# Altium footprint library FootPrintLib_10.PcbLib: 270 footprints (part 12 of 17)
Each footprint in its own frame and in the unit in brackets; x right, y up, seen from the top. Pads: shape width x height; smd on the part's side, far side on the other; paste and mask are expansions set on the pad; w line width, h text height; cw(c..) or ccw(c..) is an arc to the next point about the centre after c.
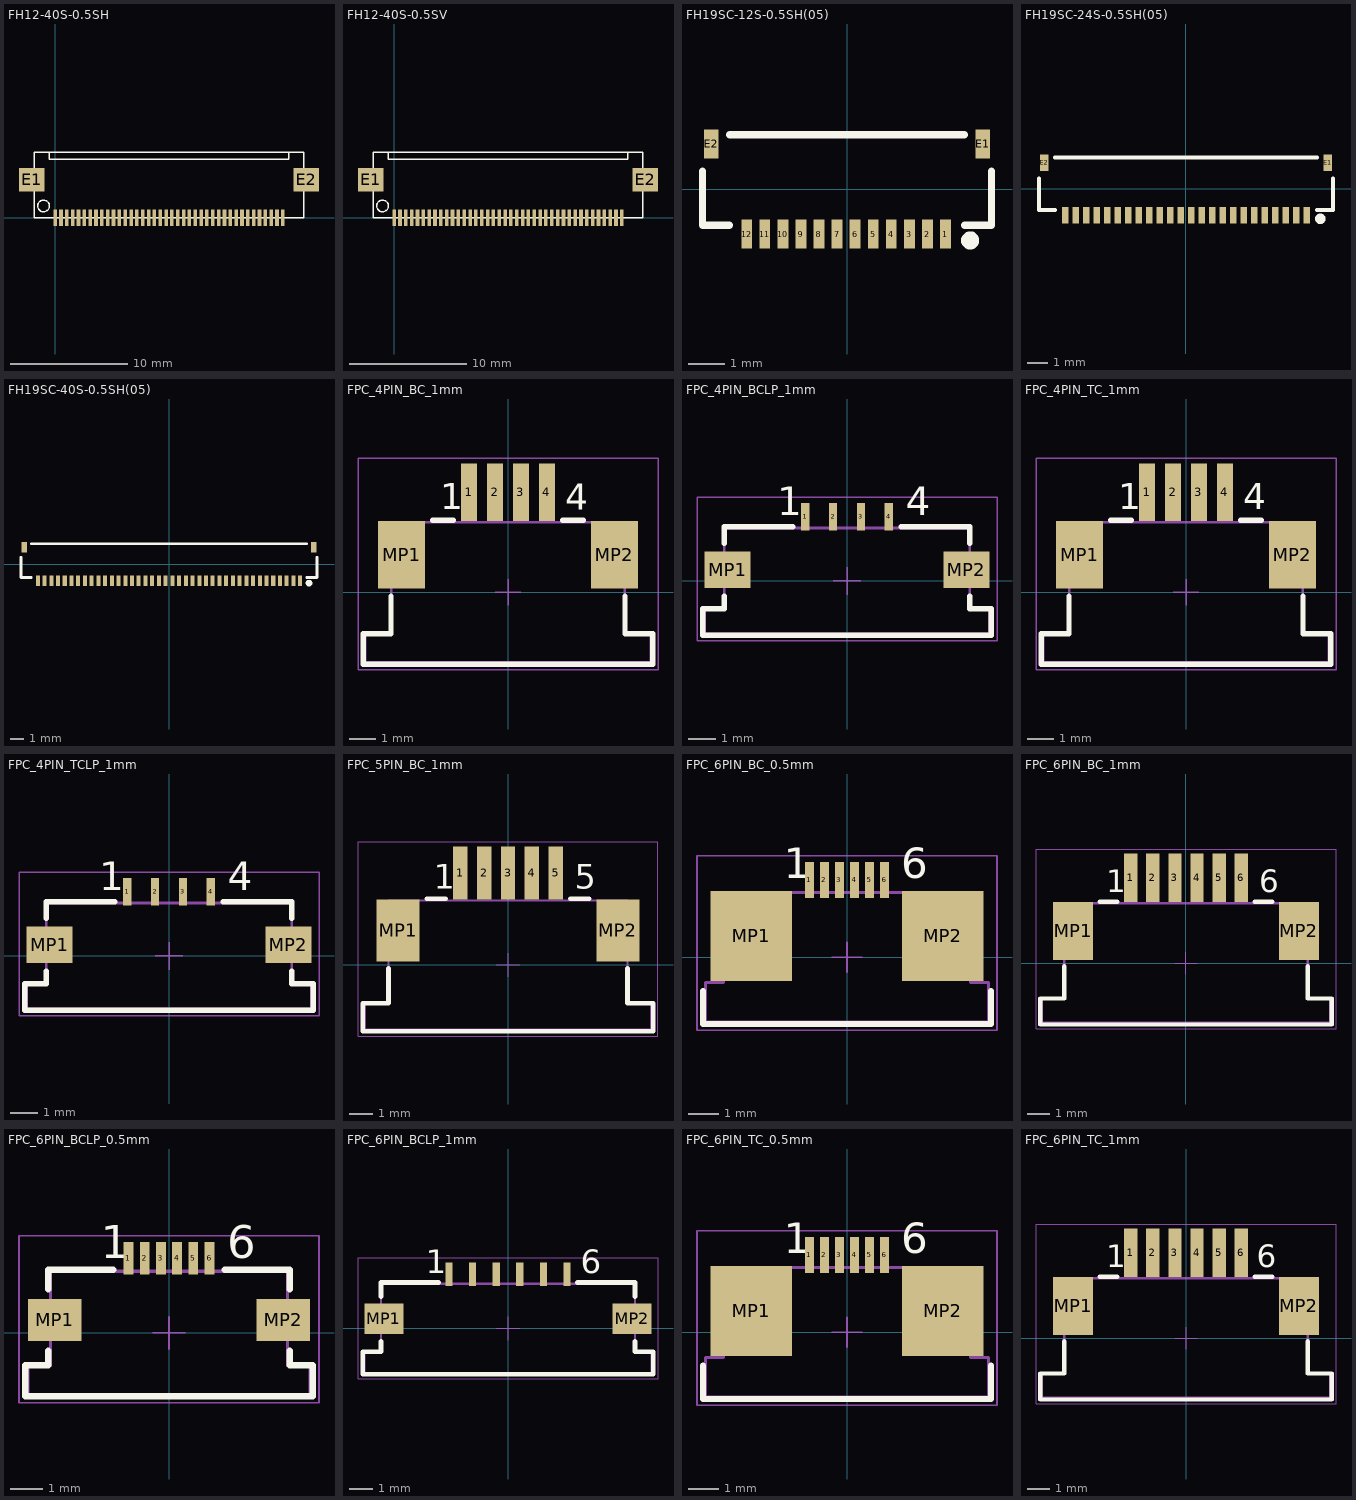
[diagram p11: the footprints below, top view; thin cyan lines are the x and y axes]

## FH12-40S-0.5SH [mm]
pads (42):
  rect 0.31x1.4 smd: 1(0,0) 2(0.5,0) 3(1,0) 4(1.5,0) 5(2,0) 6(2.5,0) 7(3,0) 8(3.5,0) 9(4,0) 10(4.5,0) 11(5,0) 12(5.5,0) 13(6,0) 14(6.5,0) 15(7,0) 16(7.5,0) 17(8,0) 18(8.5,0) 19(9,0) 20(9.5,0) 21(10,0) 22(10.5,0) 23(11,0) 24(11.5,0) 25(12,0) 26(12.5,0) 27(13,0) 28(13.5,0) 29(14,0) 30(14.5,0) 31(15,0) 32(15.5,0) 33(16,0) 34(16.5,0) 35(17,0) 36(17.5,0) 37(18,0) 38(18.5,0) 39(19,0) 40(19.5,0)
  rect 2.2x2 smd: E1(-2,3.25) E2(21.5,3.25)
Top Overlay:
  circle w0.127: c-1,1 r0.5
  lines w0.127: -0.5,5.5 -0.5,5 20,5 20,5.5 ; -1.8,0 21.3,0 21.3,5.6 -1.8,5.6 -1.8,0

## FH12-40S-0.5SV [mm]
pads (42):
  rect 0.31x1.4 smd: 1(19.5,0) 2(19,0) 3(18.5,0) 4(18,0) 5(17.5,0) 6(17,0) 7(16.5,0) 8(16,0) 9(15.5,0) 10(15,0) 11(14.5,0) 12(14,0) 13(13.5,0) 14(13,0) 15(12.5,0) 16(12,0) 17(11.5,0) 18(11,0) 19(10.5,0) 20(10,0) 21(9.5,0) 22(9,0) 23(8.5,0) 24(8,0) 25(7.5,0) 26(7,0) 27(6.5,0) 28(6,0) 29(5.5,0) 30(5,0) 31(4.5,0) 32(4,0) 33(3.5,0) 34(3,0) 35(2.5,0) 36(2,0) 37(1.5,0) 38(1,0) 39(0.5,0) 40(0,0)
  rect 2.2x2 smd: E1(-2,3.25) E2(21.5,3.25)
Top Overlay:
  circle w0.127: c-1,1 r0.5
  lines w0.127: -0.5,5.5 -0.5,5 20,5 20,5.5 ; -1.8,0 21.3,0 21.3,5.6 -1.8,5.6 -1.8,0

## FH19SC-12S-0.5SH(05) [mm] "FFC & FPC Connectors 0.5MM 12 POS R/A SMT FFC/FPC THICK .3MM"
height 0.9
pads (14):
  rect 0.3x0.8 smd: 1(2.725,-1.25) 2(2.225,-1.25) 3(1.725,-1.25) 4(1.225,-1.25) 5(0.725,-1.25) 6(0.225,-1.25) 7(-0.275,-1.25) 8(-0.775,-1.25) 9(-1.275,-1.25) 10(-1.775,-1.25) 11(-2.275,-1.25) 12(-2.775,-1.25)
  rect 0.4x0.8 smd: E1(3.75,1.25) E2(-3.75,1.25)
Top Overlay:
  circle w0.25: c3.406,-1.422 r0.125
  lines w0.2: -4,0.5 -4,-1 -3.25,-1 ; -3.25,1.5 3.25,1.5 ; 3.25,-1 4,-1 4,0.5

## FH19SC-24S-0.5SH(05) [mm] "0.5 mm Pitch FPC/FFC Connectors"
height 0.9
pads (26):
  rect 0.3x0.8 smd: 1(5.75,-1.25) 2(5.25,-1.25) 3(4.75,-1.25) 4(4.25,-1.25) 5(3.75,-1.25) 6(3.25,-1.25) 7(2.75,-1.25) 8(2.25,-1.25) 9(1.75,-1.25) 10(1.25,-1.25) 11(0.75,-1.25) 12(0.25,-1.25) 13(-0.25,-1.25) 14(-0.75,-1.25) 15(-1.25,-1.25) 16(-1.75,-1.25) 17(-2.25,-1.25) 18(-2.75,-1.25) 19(-3.25,-1.25) 20(-3.75,-1.25) 21(-4.25,-1.25) 22(-4.75,-1.25) 23(-5.25,-1.25) 24(-5.75,-1.25)
  rect 0.4x0.8 smd: E1(6.75,1.25) E2(-6.75,1.25)
Top Overlay:
  circle w0.25: c6.406,-1.422 r0.125
  lines w0.2: -7,0.5 -7,-1 -6.25,-1 ; -6.25,1.5 6.25,1.5 ; 6.25,-1 7,-1 7,0.5

## FH19SC-40S-0.5SH(05) [mm] "0.5 mm Pitch FPC/FFC Connector"
height 0.9
pads (42):
  rect 0.3x0.8 smd: 1(9.75,-1.25) 2(9.25,-1.25) 3(8.75,-1.25) 4(8.25,-1.25) 5(7.75,-1.25) 6(7.25,-1.25) 7(6.75,-1.25) 8(6.25,-1.25) 9(5.75,-1.25) 10(5.25,-1.25) 11(4.75,-1.25) 12(4.25,-1.25) 13(3.75,-1.25) 14(3.25,-1.25) 15(2.75,-1.25) 16(2.25,-1.25) 17(1.75,-1.25) 18(1.25,-1.25) 19(0.75,-1.25) 20(0.25,-1.25) 21(-0.25,-1.25) 22(-0.75,-1.25) 23(-1.25,-1.25) 24(-1.75,-1.25) 25(-2.25,-1.25) 26(-2.75,-1.25) 27(-3.25,-1.25) 28(-3.75,-1.25) 29(-4.25,-1.25) 30(-4.75,-1.25) 31(-5.25,-1.25) 32(-5.75,-1.25) 33(-6.25,-1.25) 34(-6.75,-1.25) 35(-7.25,-1.25) 36(-7.75,-1.25) 37(-8.25,-1.25) 38(-8.75,-1.25) 39(-9.25,-1.25) 40(-9.75,-1.25)
  rect 0.4x0.8 smd: E1(10.75,1.25) E2(-10.75,1.25)
Top Overlay:
  circle w0.25: c10.406,-1.422 r0.125
  lines w0.2: -11,0.5 -11,-1 -10.25,-1 ; -10.25,1.5 10.25,1.5 ; 10.25,-1 11,-1 11,0.5
3D body "31820e.STEP": height 1.2, standoff -0.02, extent -11,-1.33 11,1.67

## FPC_4PIN_BC_1mm [mm] "ZIF Connectors, Horizontal, Bottom Contact, pitch 1mm, 4p"
height 3.15
pads (6):
  rect 0.6x2.2 smd: 1(-1.5,3.85) 2(-0.5,3.85) 3(0.5,3.85) 4(1.5,3.85)
  rect 1.8x2.6 smd: MP1(-4.1,1.45) MP2(4.1,1.45)
Top Overlay:
  lines w0.2: -4.5,-0.15 -4.5,-1.6 -5.575,-1.6 -5.575,-2.775 5.575,-2.775 5.575,-1.6 4.5,-1.6 4.5,-0.15 ; -2.9,2.775 -2.1,2.775 ; 2.1,2.775 2.9,2.775
  text "4" at 2.213,3.18 h1.02
  text "1" at -2.6,3.2 h1.02
Mechanical 13:
  lines w0.1: -5.5,-2.7 5.5,-2.7 5.5,-1.6 4.5,-1.6 4.5,2.7 -4.5,2.7 -4.5,-1.6 -5.5,-1.6 -5.5,-2.7
Mechanical 15:
  lines w0.05: -0.5,0 0.5,0 ; 0,-0.5 0,0.5 ; -5.775,-2.975 5.775,-2.975 5.775,5.15 -5.775,5.15 -5.775,-2.975
3D body "68610414422.stp": height 3.02, standoff 0.01, extent -5.5,-2.7 5.5,4.4

## FPC_4PIN_BCLP_1mm [mm] "ZIF Connectors, Horizontal, Bottom Contact Low Profile, pitch 1mm, 4p"
height 1.3
pads (6):
  rect 0.3x1 smd: 1(-1.5,2.3) 2(-0.5,2.3) 3(0.5,2.3) 4(1.5,2.3)
  rect 1.65x1.3 smd: MP1(-4.275,0.4) MP2(4.275,0.4)
Top Overlay:
  lines w0.2: -4.4,-0.55 -4.4,-1 -5.175,-1 -5.175,-1.95 5.175,-1.95 5.175,-1 4.4,-1 4.4,-0.55 ; -4.4,1.35 -4.4,1.95 -1.95,1.95 ; 1.95,1.95 4.4,1.95 4.4,1.35
  text "4" at 2.1,2.35 h1.02
  text "1" at -2.5,2.35 h1.02
Mechanical 13:
  lines w0.1: -5.1,-1 -4.4,-1 -4.4,1.9 4.4,1.9 4.4,-1 5.1,-1 5.1,-1.9 -5.1,-1.9 -5.1,-1 ; -5.1,-1 -5.1,-1
Mechanical 15:
  lines w0.05: -0.5,0 0.5,0 ; 0,-0.5 0,0.5 ; -5.375,-2.15 5.375,-2.15 5.375,3 -5.375,3 -5.375,-2.15
3D body "686104183522.stp": height 1.24, standoff -0.01, extent -5.1,-1.9 5.1,2.35

## FPC_4PIN_TC_1mm [mm] "ZIF Connectors, Horizontal, Top Contact, pitch 1mm, 4p"
height 3.15
pads (6):
  rect 0.6x2.2 smd: 1(-1.5,3.85) 2(-0.5,3.85) 3(0.5,3.85) 4(1.5,3.85)
  rect 1.8x2.6 smd: MP1(-4.1,1.45) MP2(4.1,1.45)
Top Overlay:
  lines w0.2: -4.5,-0.15 -4.5,-1.6 -5.575,-1.6 -5.575,-2.775 5.575,-2.775 5.575,-1.6 4.5,-1.6 4.5,-0.15 ; -2.9,2.775 -2.1,2.775 ; 2.1,2.775 2.9,2.775
  text "1" at -2.6,3.2 h1.02
  text "4" at 2.2,3.2 h1.02
Mechanical 13:
  lines w0.1: -5.5,-2.7 -5.5,-1.6 -4.5,-1.6 -4.5,2.7 4.5,2.7 4.5,-1.6 5.5,-1.6 5.5,-2.7 -5.5,-2.7
Mechanical 15:
  lines w0.05: -0.5,0 0.5,0 ; 0,-0.5 0,0.5 ; -5.775,-2.975 5.775,-2.975 5.775,5.15 -5.775,5.15 -5.775,-2.975
3D body "68610414122.stp": height 3.02, standoff 0.02, extent -5.5,-2.7 5.5,4.4

## FPC_4PIN_TCLP_1mm [mm] "ZIF Connectors, Horizontal, Top Contact Low Profile, pitch 1mm, 4p"
height 1.3
pads (6):
  rect 0.3x1 smd: 1(-1.5,2.3) 2(-0.5,2.3) 3(0.5,2.3) 4(1.5,2.3)
  rect 1.65x1.3 smd: MP1(-4.275,0.4) MP2(4.275,0.4)
Top Overlay:
  lines w0.2: -4.4,-0.55 -4.4,-1 -5.175,-1 -5.175,-1.95 5.175,-1.95 5.175,-1 4.4,-1 4.4,-0.55 ; -4.4,1.35 -4.4,1.95 -1.95,1.95 ; 1.95,1.95 4.4,1.95 4.4,1.35
  text "1" at -2.5,2.35 h1.02
  text "4" at 2.1,2.35 h1.02
Mechanical 13:
  lines w0.1: -5.1,-1 -5.1,-1.9 5.1,-1.9 5.1,-1 4.4,-1 4.4,1.9 -4.4,1.9 -4.4,-1 -5.1,-1 ; -5.1,-1 -5.1,-1
Mechanical 15:
  lines w0.05: -0.5,0 0.5,0 ; 0,-0.5 0,0.5 ; -5.375,-2.15 -5.375,3 5.375,3 5.375,-2.15 -5.375,-2.15
3D body "686104183422.stp": height 1.28, standoff -0.01, extent -5.1,-1.9 5.1,2.35

## FPC_5PIN_BC_1mm [mm] "ZIF Connectors, Horizontal, Bottom Contact, pitch 1mm, 5p"
height 3.15
pads (7):
  rect 0.6x2.2 smd: 1(-2,3.85) 2(-1,3.85) 3(0,3.85) 4(1,3.85) 5(2,3.85)
  rect 1.8x2.6 smd: MP1(-4.6,1.45) MP2(4.6,1.45)
Top Overlay:
  lines w0.2: -5,-0.15 -5,-1.6 -6.075,-1.6 -6.075,-2.775 6.075,-2.775 6.075,-1.6 5,-1.6 5,-0.15 ; -3.4,2.775 -2.6,2.775 ; 2.6,2.775 3.4,2.775
  text "5" at 2.8,3.2 h1.02
  text "1" at -3.1,3.2 h1.02
Mechanical 13:
  lines w0.1: -6,-2.7 -6,-1.6 -5,-1.6 -5,2.7 5,2.7 5,-1.6 6,-1.6 6,-2.7 -6,-2.7
Mechanical 15:
  lines w0.05: -0.5,0 0.5,0 ; 0,-0.5 0,0.5 ; -6.275,-2.975 -6.275,5.15 6.275,5.15 6.275,-2.975 -6.275,-2.975
3D body "68610514422.stp": height 3.02, standoff 0.01, extent -6,-2.7 6,4.4

## FPC_6PIN_BC_0.5mm [mm] "ZIF Connectors, Horizontal, Bottom Contact, pitch 0.5mm, 6p"
height 2.25
pads (8):
  rect 0.3x1.2 smd: 1(-1.25,2.56) 2(-0.75,2.56) 3(-0.25,2.56) 4(0.25,2.56) 5(0.75,2.56) 6(1.25,2.56)
  rect 2.7x3 smd: MP1(-3.18,0.7) MP2(3.18,0.7)
Top Overlay:
  lines w0.2: -4.775,-1.125 -4.775,-2.225 4.775,-2.225 4.775,-1.125
  text "1" at -2.1,2.61 h1.02
  text "6" at 1.8,2.61 h1.02
Mechanical 13:
  lines w0.1: -4.7,-2.15 -4.7,-0.85 -4.1,-0.85 -4.1,2.15 4.1,2.15 4.1,-0.85 4.7,-0.85 4.7,-2.15 -4.7,-2.15
Mechanical 15:
  lines w0.05: -0.5,0 0.5,0 ; 0,-0.5 0,0.5 ; -4.975,-2.425 4.975,-2.425 4.975,3.36 -4.975,3.36 -4.975,-2.425
3D body "68710614522.stp": height 2.1, standoff 0, extent -4.7,-2.15 4.7,2.95

## FPC_6PIN_BC_1mm [mm] "ZIF Connectors, Horizontal, Bottom Contact, pitch 1mm, 6p"
height 3.15
pads (8):
  rect 0.6x2.2 smd: 1(-2.5,3.85) 2(-1.5,3.85) 3(-0.5,3.85) 4(0.5,3.85) 5(1.5,3.85) 6(2.5,3.85)
  rect 1.8x2.6 smd: MP1(-5.1,1.45) MP2(5.1,1.45)
Top Overlay:
  lines w0.2: -5.5,-0.15 -5.5,-1.6 -6.575,-1.6 -6.575,-2.775 6.575,-2.775 6.575,-1.6 5.5,-1.6 5.5,-0.15 ; -3.9,2.775 -3.1,2.775 ; 3.1,2.775 3.9,2.775
  text "1" at -3.6,3.2 h1.02
  text "6" at 3.3,3.2 h1.02
Mechanical 13:
  lines w0.1: -6.5,-2.7 -6.5,-1.6 -5.5,-1.6 -5.5,2.7 5.5,2.7 5.5,-1.6 6.5,-1.6 6.5,-2.7 -6.5,-2.7
Mechanical 15:
  lines w0.05: -0.5,0 0.5,0 ; 0,-0.5 0,0.5 ; -6.775,-2.975 -6.775,5.15 6.775,5.15 6.775,-2.975 -6.775,-2.975
3D body "68610614422.stp": height 3.02, standoff 0.01, extent -6.5,-2.7 6.5,4.4

## FPC_6PIN_BCLP_0.5mm [mm] "ZIF Connectors, Horizontal, Bottom Contact Low Profile, pitch 0.5mm, 6p"
height 1.3
pads (8):
  rect 0.3x1 smd: 1(-1.25,2.3) 2(-0.75,2.3) 3(-0.25,2.3) 4(0.25,2.3) 5(0.75,2.3) 6(1.25,2.3)
  rect 1.65x1.3 smd: MP1(-3.525,0.4) MP2(3.525,0.4)
Top Overlay:
  lines w0.2: -3.725,-0.55 -3.725,-1 -4.425,-1 -4.425,-1.95 4.425,-1.95 4.425,-1 3.725,-1 3.725,-0.55 ; -3.725,1.35 -3.725,1.95 -1.725,1.95 ; 1.725,1.95 3.725,1.95 3.725,1.35
  text "1" at -2.1,2.3 h1.02
  text "6" at 1.8,2.3 h1.02
Mechanical 13:
  lines w0.1: -4.35,-1.9 -4.35,-1 -3.65,-1 -3.65,1.9 3.65,1.9 3.65,-1 4.35,-1 4.35,-1.9 -4.35,-1.9
Mechanical 15:
  lines w0.05: -0.5,0 0.5,0 ; 0,-0.5 0,0.5 ; -4.625,-2.15 -4.625,3 4.625,3 4.625,-2.15 -4.625,-2.15
3D body "687106183722.stp": height 1.28, standoff -0.01, extent -4.35,-1.9 4.35,2.35

## FPC_6PIN_BCLP_1mm [mm] "ZIF Connectors, Horizontal, Bottom Contact Low Profile, pitch 1mm, 6p"
height 1.3
pads (8):
  rect 0.3x1 smd: 1(-2.5,2.3) 2(-1.5,2.3) 3(-0.5,2.3) 4(0.5,2.3) 5(1.5,2.3) 6(2.5,2.3)
  rect 1.65x1.3 smd: MP1(-5.275,0.4) MP2(5.275,0.4)
Top Overlay:
  lines w0.2: -5.4,-0.55 -5.4,-1 -6.175,-1 -6.175,-1.95 6.175,-1.95 6.175,-1 5.4,-1 5.4,-0.55 ; -5.4,1.35 -5.4,1.95 -2.95,1.95 ; 2.95,1.95 5.4,1.95 5.4,1.35
  text "6" at 3.1,2.35 h1.02
  text "1" at -3.5,2.35 h1.02
Mechanical 13:
  lines w0.1: -6.1,-1 -6.1,-1.9 6.1,-1.9 6.1,-1 5.4,-1 5.4,1.9 -5.4,1.9 -5.4,-1 -6.1,-1 ; -6.1,-1 -6.1,-1
Mechanical 15:
  lines w0.05: -0.5,0 0.5,0 ; 0,-0.5 0,0.5 ; -6.375,-2.15 -6.375,3 6.375,3 6.375,-2.15 -6.375,-2.15
3D body "686106183522.stp": height 1.24, standoff -0.01, extent -6.1,-1.9 6.1,2.35

## FPC_6PIN_TC_0.5mm [mm] "ZIF Connectors, Horizontal, Top Contact, pitch 0.5mm, 6p"
height 2.25
pads (8):
  rect 0.3x1.2 smd: 1(-1.25,2.56) 2(-0.75,2.56) 3(-0.25,2.56) 4(0.25,2.56) 5(0.75,2.56) 6(1.25,2.56)
  rect 2.7x3 smd: MP1(-3.18,0.7) MP2(3.18,0.7)
Top Overlay:
  lines w0.2: -4.775,-1.1 -4.775,-2.225 4.775,-2.225 4.775,-1.1
  text "1" at -2.1,2.61 h1.02
  text "6" at 1.8,2.61 h1.02
Mechanical 13:
  lines w0.1: -4.7,-2.15 4.7,-2.15 4.7,-0.85 4.1,-0.85 4.1,2.15 -4.1,2.15 -4.1,-0.85 -4.7,-0.85 -4.7,-2.15
Mechanical 15:
  lines w0.05: -0.5,0 0.5,0 ; 0,-0.5 0,0.5 ; -4.975,-2.425 4.975,-2.425 4.975,3.36 -4.975,3.36 -4.975,-2.425
3D body "68710614022.stp": height 2.1, standoff 0, extent -4.7,-2.15 4.7,2.95

## FPC_6PIN_TC_1mm [mm] "ZIF Connectors, Horizontal, Top Contact, pitch 1mm, 6p"
height 3.15
pads (8):
  rect 0.6x2.2 smd: 1(-2.5,3.85) 2(-1.5,3.85) 3(-0.5,3.85) 4(0.5,3.85) 5(1.5,3.85) 6(2.5,3.85)
  rect 1.8x2.6 smd: MP1(-5.1,1.45) MP2(5.1,1.45)
Top Overlay:
  lines w0.2: -5.5,-0.15 -5.5,-1.6 -6.575,-1.6 -6.575,-2.775 6.575,-2.775 6.575,-1.6 5.5,-1.6 5.5,-0.15 ; -3.9,2.775 -3.1,2.775 ; 3.1,2.775 3.9,2.775
  text "6" at 3.2,3.2 h1.02
  text "1" at -3.6,3.2 h1.02
Mechanical 13:
  lines w0.1: -6.5,-2.7 6.5,-2.7 6.5,-1.6 5.5,-1.6 5.5,2.7 -5.5,2.7 -5.5,-1.6 -6.5,-1.6 -6.5,-2.7
Mechanical 15:
  lines w0.05: -0.5,0 0.5,0 ; 0,-0.5 0,0.5 ; -6.775,-2.975 -6.775,5.15 6.775,5.15 6.775,-2.975 -6.775,-2.975
3D body "68610614122.stp": height 3.02, standoff 0.02, extent -6.5,-2.7 6.5,4.4